# Altium footprint library MainController.PcbLib: 68 footprints (part 1 of 5)
Each footprint in its own frame and in the unit in brackets; x right, y up, seen from the top. Pads: shape width x height; smd on the part's side, far side on the other; paste and mask are expansions set on the pad; w line width, h text height; cw(c..) or ccw(c..) is an arc to the next point about the centre after c.
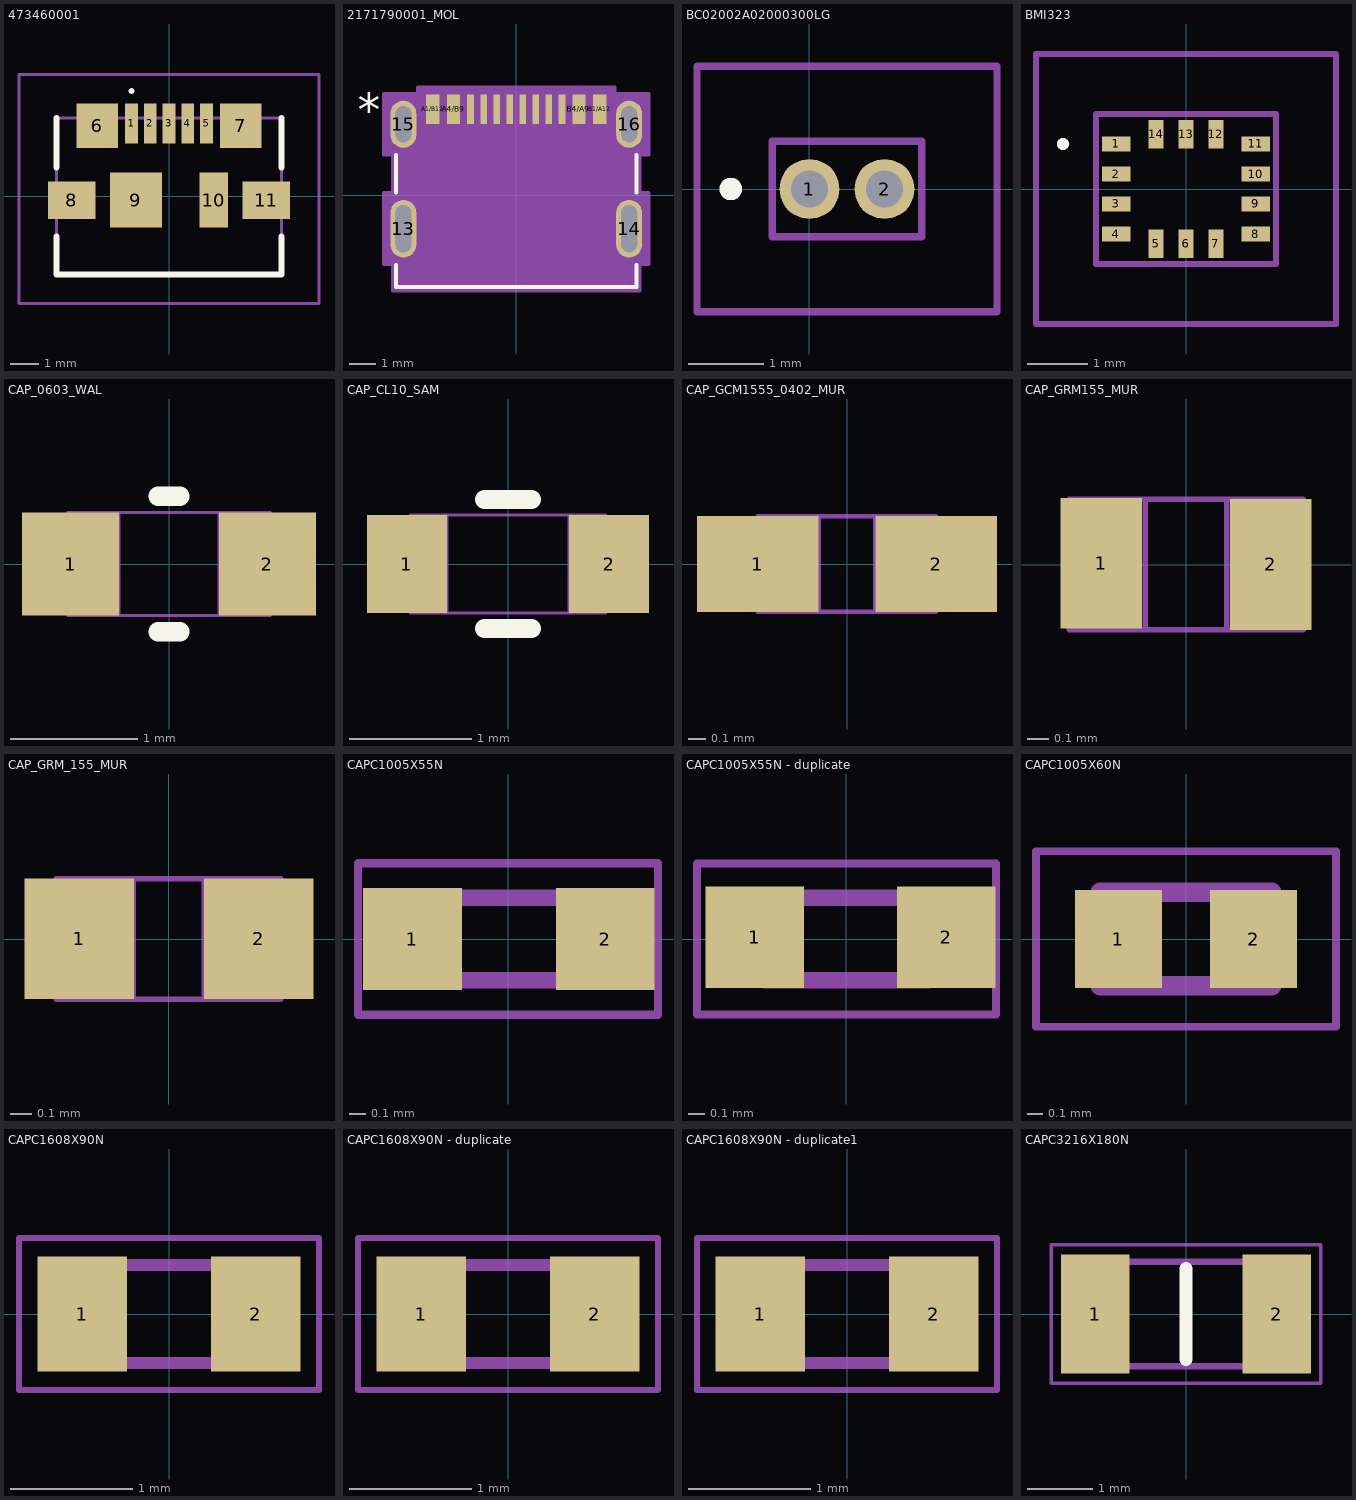
[diagram p0: the footprints below, top view; thin cyan lines are the x and y axes]

## 473460001 [mm]
pads (11):
  rect 0.45x1.38 smd: 1(-1.3,2.525) 2(-0.65,2.525) 3(0,2.525) 4(0.65,2.525) 5(1.3,2.525)
  rect 1.425x1.55 smd: 6(-2.487,2.44) 7(2.487,2.44)
  rect 1.65x1.3 smd: 8(-3.375,-0.135) 11(3.375,-0.135)
  rect 1.8x1.9 smd: 9(-1.15,-0.135)
  rect 1x1.9 smd: 10(1.55,-0.135)
Top Overlay:
  lines w0.1: -1.3,3.6 ccw(c-1.3,3.65) -1.3,3.7 ; -1.3,3.6 cw(c-1.3,3.65) -1.3,3.7 ; -1.3,3.6 ccw(c-1.3,3.65) -1.3,3.7
  lines w0.2: -3.9,-1.4 -3.9,-2.715 3.9,-2.715 3.9,-1.4 ; -3.9,1 -3.9,2.715 ; 3.9,1 3.9,2.715
Mechanical 13:
  lines w0.1: -3.9,-2.715 -3.9,2.715 3.9,2.715 3.9,-2.715 -3.9,-2.715
Mechanical 15:
  lines w0.1: -5.2,-3.715 -5.2,4.215 5.2,4.215 5.2,-3.715 -5.2,-3.715
3D body "47346-0001.stp": height 2.72, standoff -0.22, extent -3.99,-3.26 3.99,2.17

## 2171790001_MOL [mil]
pads (16):
  oval 39x87 hole 71 slot 24 at 0 deg paste-99999 mask-43.5: 13(-170.08,-50.07) 14(170.08,-50.07)
  oval 39x71 hole 55 slot 24 at 0 deg paste-99999 mask-35.5: 15(-170.08,107.41) 16(170.08,107.41)
  rect 20x45 smd paste+0 mask+0: A1/B12(-125.98,130.05) A4/B9(-94.49,130.05) B1/A12(125.98,130.05) B4/A9(94.49,130.05)
  rect 10x45 smd paste+0 mask+0: A5(-49.21,130.05) A6(-9.84,130.05) A7(9.84,130.05) A8(49.21,130.05) B5(68.9,130.05) B6(29.53,130.05) B7(-29.53,130.05) B8(-68.9,130.05)
Top Overlay:
  lines w6: -181,-104.79 -181,-138 181,-138 181,-104.79 ; -181,4.65 -181,60.69 ; 181,4.65 181,60.69
  text "*" at -238.48,105.05 h50
Mechanical 13:
  lines w1: -176,-133 -176,133 176,133 176,-133 -176,-133
  text "*" at -238.48,105.05 h50
Mechanical 15:
  region: -186,-103.57 -186,-143 186,-143 186,-103.57 199.58,-103.57 199.58,3.43 186,3.43 186,61.91 199.58,61.91 199.58,152.91 147.98,152.91 147.98,162.55 -147.98,162.55 -147.98,152.91 -199.58,152.91 -199.58,61.91 -186,61.91 -186,3.43 -199.58,3.43 -199.58,-103.57
  lines w6: -199.58,-103.57 -199.58,3.43 -186,3.43 -186,61.91 -199.58,61.91 -199.58,152.91 -147.98,152.91 -147.98,162.55 147.98,162.55 147.98,152.91 199.58,152.91 199.58,61.91 186,61.91 186,3.43 199.58,3.43 199.58,-103.57 186,-103.57 186,-143 -186,-143 -186,-103.57 -199.58,-103.57
3D body "UJ20-C-H-G-SMT-1-P16-TR.STEP": height 130.31, standoff -37.8, extent -181.89,-161.52 170.08,137.7

## BC02002A02000300LG [mm]
pads (2):
  round 0.8 hole 0.5: 1(0,0) 2(1,0)
Top Overlay:
  lines w0.2: -1.1,0 ccw(c-1.05,0) -1,0 ; -1.1,0 cw(c-1.05,0) -1,0 ; -1.1,0 ccw(c-1.05,0) -1,0
Mechanical 13:
  lines w0.1: -0.5,-0.635 1.5,-0.635 1.5,0.635 -0.5,0.635 -0.5,-0.635
Mechanical 15:
  lines w0.1: -1.5,-1.635 2.5,-1.635 2.5,1.635 -1.5,1.635 -1.5,-1.635
3D body "BC020-02-A-0200-0300-L-G.stp": height 3, standoff -3, extent -0.5,-0.635 1.5,0.635

## BMI323 [mm]
pads (14):
  rect 0.475x0.25 smd: 1(-1.163,0.75) 2(-1.163,0.25) 3(-1.163,-0.25) 4(-1.163,-0.75) 8(1.163,-0.75) 9(1.163,-0.25) 10(1.163,0.25) 11(1.163,0.75)
  rect 0.25x0.475 smd: 5(-0.5,-0.913) 6(0,-0.913) 7(0.5,-0.913) 12(0.5,0.913) 13(0,0.913) 14(-0.5,0.913)
Top Overlay:
  lines w0.1: -2.1,0.75 ccw(c-2.05,0.75) -2,0.75 ccw(c-2.05,0.75) -2.1,0.75
Mechanical 13:
  lines w0.1: -1.5,-1.25 1.5,-1.25 1.5,1.25 -1.5,1.25 -1.5,-1.25
Mechanical 15:
  lines w0.1: -2.5,-2.25 2.5,-2.25 2.5,2.25 -2.5,2.25 -2.5,-2.25
3D body "BMI323.stp": height 0.84, standoff 0, extent -1.5,-1.25 1.5,1.25

## CAP_0603_WAL [mil]
pads (2):
  rect 30x32 smd paste+0 mask+0: 1(-30.5,0) 2(30.5,0)
Top Overlay:
  lines w6: -3.39,-21 3.39,-21 ; -3.39,21 3.39,21
Mechanical 13:
  lines w1: -31.5,-16 -31.5,16 ; -31.5,-16 31.5,-16 ; -31.5,-16 -15.5,-16 -15.5,16 -31.5,16 ; -31.5,-16 -31.5,16 ; -31.5,16 31.5,16 ; 31.5,-16 31.5,16 ; 31.5,-16 31.5,16 ; 31.5,-16 15.5,-16 15.5,16 31.5,16
3D body "CAP_0603_WAL.step": height 32.01, standoff 0, extent -31.29,-15.98 31.7,15.98

## CAP_CL10_SAM [mm]
pads (2):
  rect 0.65x0.8 smd paste+0 mask+0: 1(-0.825,0) 2(0.825,0)
Top Overlay:
  lines w0.152: -0.192,-0.527 0.192,-0.527 ; -0.192,0.527 0.192,0.527
Mechanical 13:
  circle w0.025: c-0.698,0 r0.076
  lines w0.025: -0.8,-0.4 -0.8,0.4 ; -0.8,-0.4 0.8,-0.4 ; -0.8,-0.4 -0.5,-0.4 -0.5,0.4 -0.8,0.4 ; -0.8,-0.4 -0.8,0.4 ; -0.8,0.4 0.8,0.4 ; 0.8,-0.4 0.8,0.4 ; 0.8,-0.4 0.8,0.4 ; 0.8,-0.4 0.5,-0.4 0.5,0.4 0.8,0.4
3D body "CAP_CL10_SAM.step": height 0.9, standoff 0, extent -0.776,-0.326 0.824,0.474

## CAP_GCM1555_0402_MUR [mil]
pads (2):
  rect 28x22 smd paste+0 mask+0: 1(-20.5,0) 2(20.5,0)
Mechanical 13:
  lines w1: -20.5,-11 -20.5,11 ; -20.5,-11 20.5,-11 ; -20.5,-11 -6.5,-11 -6.5,11 -20.5,11 ; -20.5,-11 -20.5,11 ; -20.5,11 20.5,11 ; 20.5,-11 20.5,11 ; 20.5,-11 20.5,11 ; 20.5,-11 6.5,-11 6.5,11 20.5,11
3D body "CAP_GCM1555_0402_MUR.step": height 22.01, standoff 0, extent -20.06,-11.97 20.96,10

## CAP_GRM155_MUR [mil]
pads (2):
  rect 15x24 smd paste+0 mask+0: 1(-15.57,0.23) 2(15.54,0.04)
Mechanical 13:
  circle w0: c-16.5,0 r3
  lines w1: -21.5,-12 -21.5,12 ; -21.5,-12 -7.5,-12 -7.5,12 -21.5,12 ; -21.5,-12 21.5,-12 ; -21.5,-12 -21.5,12 ; -21.5,12 21.5,12 ; 21.5,-12 7.5,-12 7.5,12 21.5,12 ; 21.5,-12 21.5,12 ; 21.5,-12 21.5,12
3D body "CAP_GRM155_MUR.step": height 24.02, standoff 0, extent -21.55,-11.25 21.44,12.77

## CAP_GRM_155_MUR [mil]
pads (2):
  rect 20x22 smd paste+0 mask+0: 1(-16.34,0.06) 2(16.47,0.07)
Mechanical 13:
  lines w1: -20.5,-11 -20.5,11 ; -20.5,-11 20.5,-11 ; -20.5,-11 -6.5,-11 -6.5,11 -20.5,11 ; -20.5,-11 -20.5,11 ; -20.5,11 20.5,11 ; 20.5,-11 20.5,11 ; 20.5,-11 20.5,11 ; 20.5,-11 6.5,-11 6.5,11 20.5,11
3D body "CAP_GRM_155_MUR.step": height 22.01, standoff 0, extent -20.55,-11.37 20.47,10.6

## CAPC1005X55N [mm]
pads (2):
  rect 0.6x0.62 smd: 1(-0.581,0) 2(0.59,0)
Mechanical 15:
  lines w0.1: -0.5,-0.25 -0.5,0.25 0.5,0.25 0.5,-0.25 -0.5,-0.25
Mechanical 20:
  lines w0.05: -0.91,-0.46 -0.91,0.46 0.91,0.46 0.91,-0.46 -0.91,-0.46
3D body "CL05A105KO5NNNC.stp": height 0.55, standoff 0, extent -0.5,-0.246 0.5,0.254

## CAPC1005X55N - duplicate [mm]
pads (2):
  rect 0.6x0.62 smd: 1(-0.557,0.01) 2(0.606,0.01)
Mechanical 15:
  lines w0.1: -0.5,-0.25 0.5,-0.25 0.5,0.25 -0.5,0.25 -0.5,-0.25
Mechanical 20:
  lines w0.05: -0.91,-0.46 0.91,-0.46 0.91,0.46 -0.91,0.46 -0.91,-0.46
3D body "CL05B104KO5NNNC.stp": height 0.55, standoff 0, extent -0.476,-0.24 0.524,0.26

## CAPC1005X60N [mm]
pads (2):
  rect 0.56x0.63 smd paste+0 mask+0.102: 1(-0.435,0) 2(0.435,0)
Mechanical 13:
  lines w0.127: -0.55,-0.3 -0.55,0.3 0.55,0.3 0.55,-0.3 -0.55,-0.3
Mechanical 15:
  lines w0.05: -0.965,-0.565 -0.965,0.565 0.965,0.565 0.965,-0.565 -0.965,-0.565
3D body "step_temp.STEP": height 0.6, standoff 0, extent -0.5,-0.25 0.5,0.25

## CAPC1608X90N [mm]
pads (2):
  rect 0.73x0.94 smd: 1(-0.71,0) 2(0.71,0)
Mechanical 15:
  lines w0.1: -0.8,-0.4 0.8,-0.4 0.8,0.4 -0.8,0.4 -0.8,-0.4
Mechanical 20:
  lines w0.05: -1.225,-0.62 1.225,-0.62 1.225,0.62 -1.225,0.62 -1.225,-0.62
3D body "CL10A475KP8NNNC.stp": height 0.9, standoff 0, extent -0.8,-0.4 0.8,0.4

## CAPC1608X90N - duplicate [mm]
pads (2):
  rect 0.73x0.94 smd: 1(-0.71,0) 2(0.71,0)
Mechanical 15:
  lines w0.1: -0.8,-0.4 -0.8,0.4 0.8,0.4 0.8,-0.4 -0.8,-0.4
Mechanical 20:
  lines w0.05: -1.225,-0.62 -1.225,0.62 1.225,0.62 1.225,-0.62 -1.225,-0.62
3D body "CL10A225KP8NNNC.stp": height 0.9, standoff 0, extent -0.8,-0.4 0.8,0.4

## CAPC1608X90N - duplicate1 [mm]
pads (2):
  rect 0.73x0.94 smd: 1(-0.71,0) 2(0.71,0)
Mechanical 15:
  lines w0.1: -0.8,-0.4 0.8,-0.4 0.8,0.4 -0.8,0.4 -0.8,-0.4
Mechanical 20:
  lines w0.05: -1.225,-0.62 1.225,-0.62 1.225,0.62 -1.225,0.62 -1.225,-0.62

## CAPC3216X180N [mm]
pads (2):
  rect 1.05x1.82 smd: 1(-1.39,0) 2(1.39,0)
Top Overlay:
  lines w0.2: 0,-0.7 0,0.7
Mechanical 15:
  lines w0.1: -1.6,-0.8 -1.6,0.8 1.6,0.8 1.6,-0.8 -1.6,-0.8
Mechanical 20:
  lines w0.05: -2.065,-1.06 -2.065,1.06 2.065,1.06 2.065,-1.06 -2.065,-1.06
3D body "CL31A107MQHNNWE.stp": height 1.8, standoff 0, extent -1.6,-0.8 1.6,0.8